# Altium schematic symbol library IntegratedCircuit.SchLib: 131 symbols (part 3 of 3)
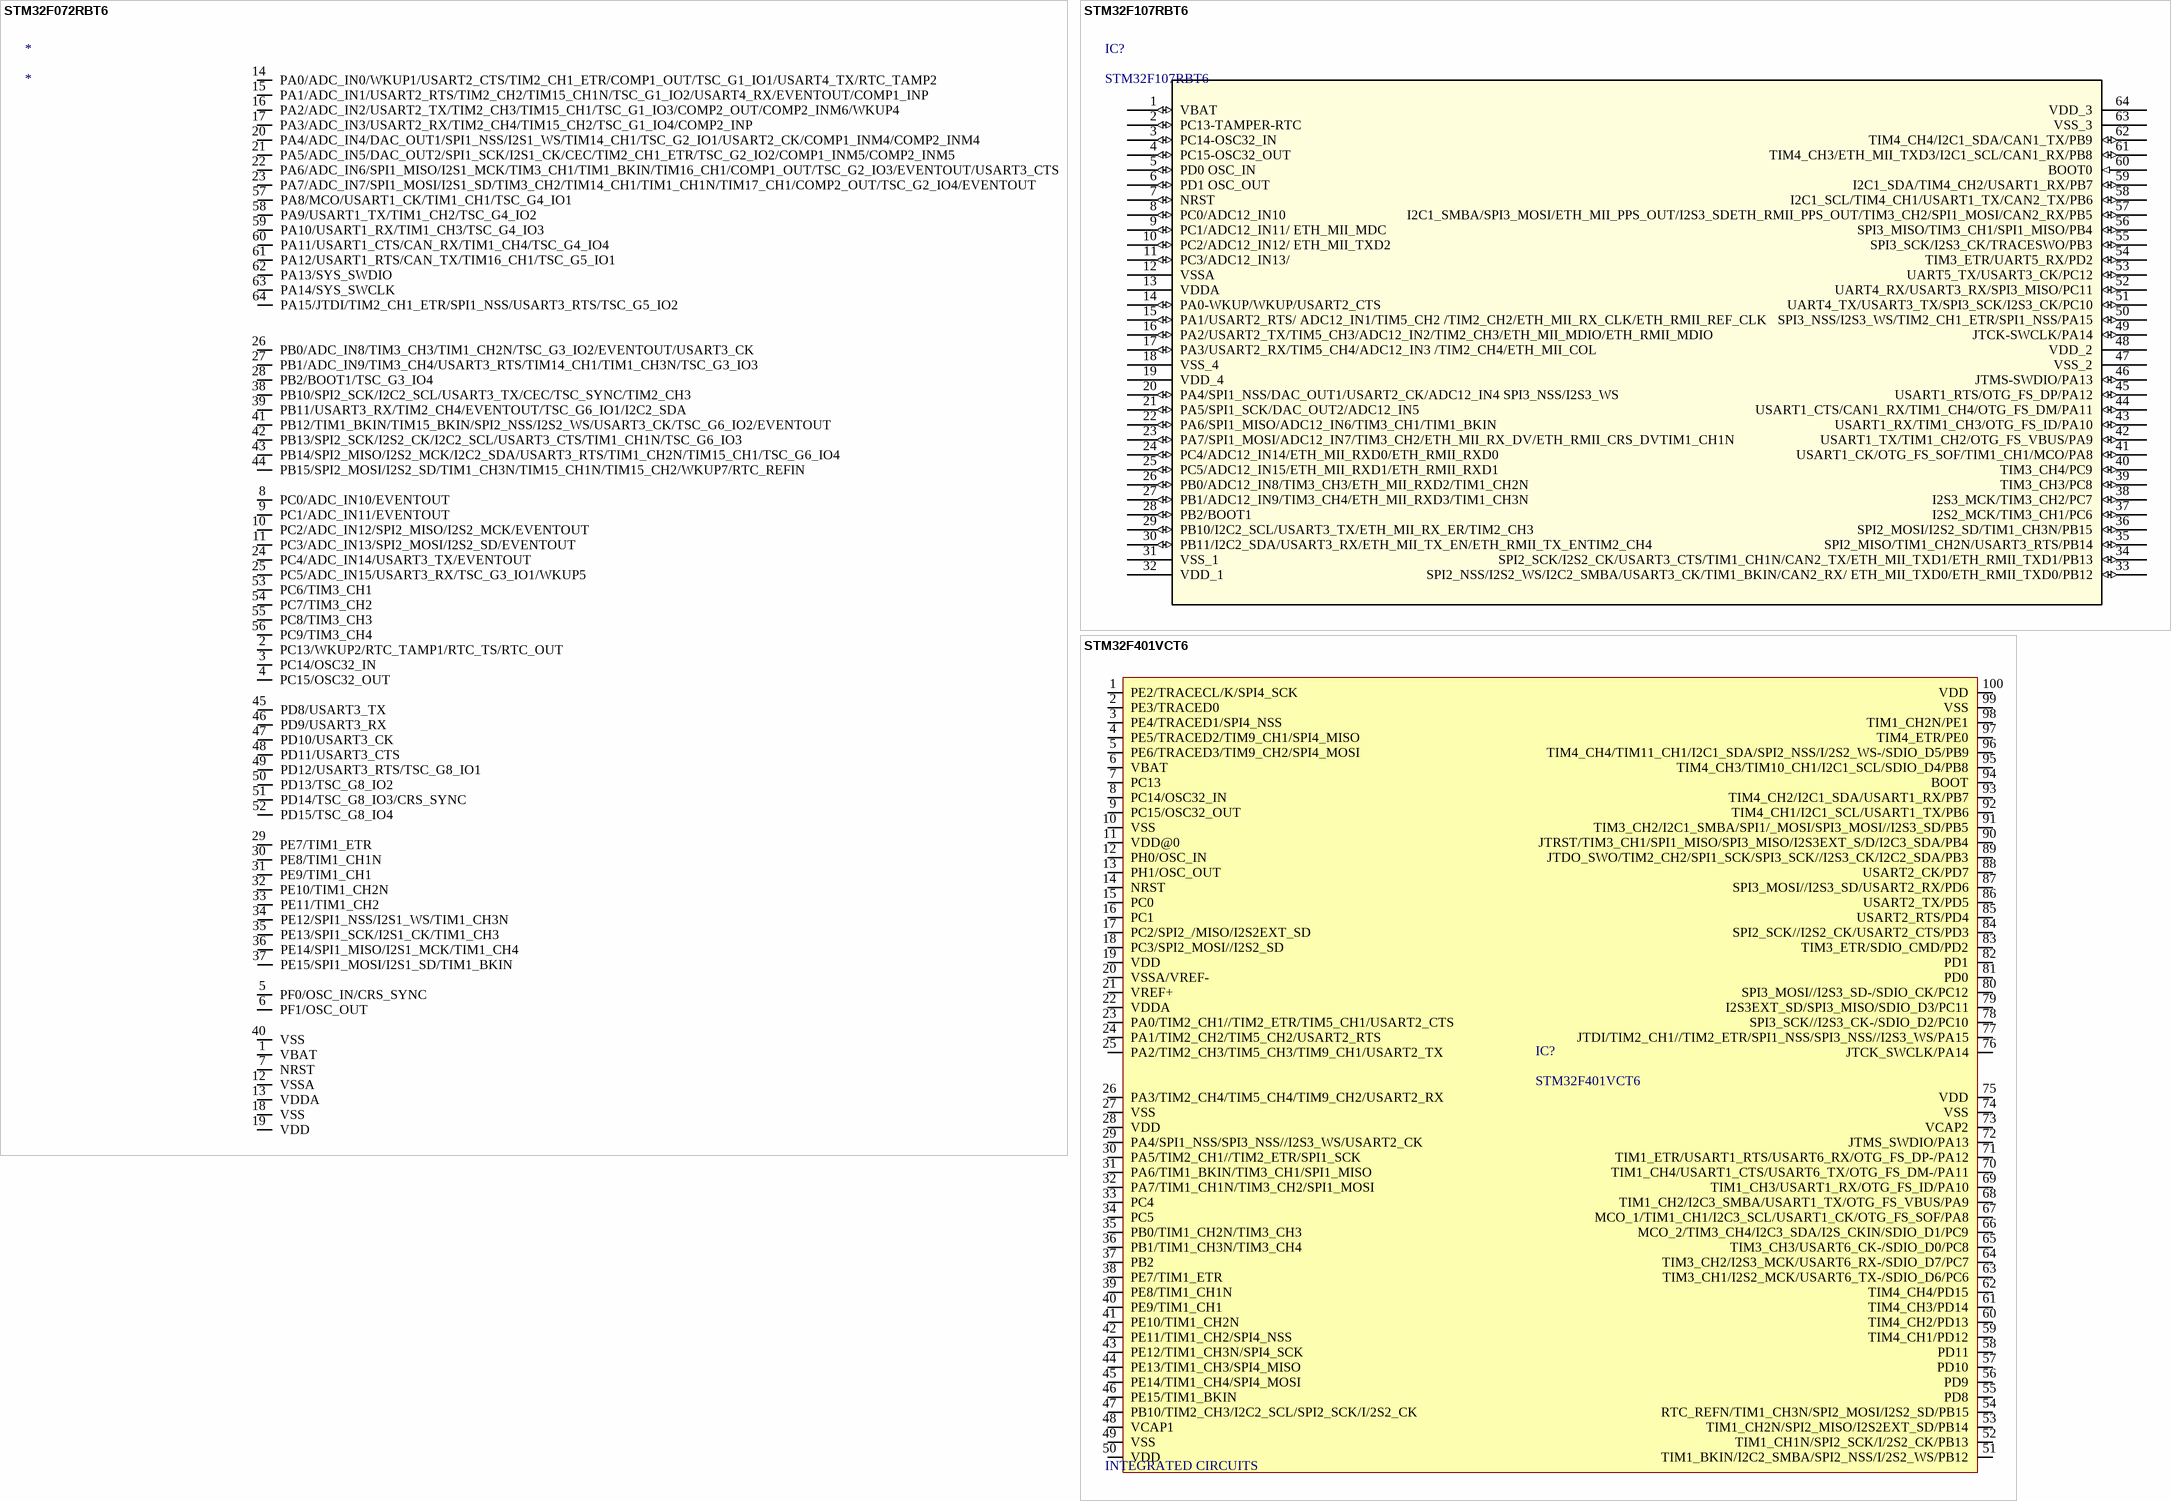
[diagram p13: symbols STM32F072RBT6 to STM32F401VCT6]

## STM32F401VCT6
designator IC?  Category: INTEGRATED CIRCUITS
STMICROELECTRONICS   STM32F401VCT6   32 Bit Microcontroller, Dynamic Efficiency Line, ARM Cortex-M4, 84 MHz, 256 KB, 64 KB, 100 Pins; Purpose Of Usage: BASIC; Supplier 1: Digi-Key; Supplier Part Number 1: 497-14048-ND; Manufacturer: STMicroelectronics; Manufacturer Part Number: STM32F401VCT6; Stock 1: 5454; RoHS: YES; Case/Package: LQFP; Package Quantity: 540; Lead Free: Lead Free; Sub-Category: MCU; Mount: SMD; Stock ID: ??
footprint LQFP100_14X14
pins: 1 PE2/TRACECL/K/SPI4_SCK, 2 PE3/TRACED0, 3 PE4/TRACED1/SPI4_NSS, 4 PE5/TRACED2/TIM9_CH1/SPI4_MISO, 5 PE6/TRACED3/TIM9_CH2/SPI4_MOSI, 6 VBAT, 7 PC13, 8 PC14/OSC32_IN, 9 PC15/OSC32_OUT, 10 VSS, 11 VDD@0, 12 PH0/OSC_IN, 13 PH1/OSC_OUT, 14 NRST, 15 PC0, 16 PC1, 17 PC2/SPI2_/MISO/I2S2EXT_SD, 18 PC3/SPI2_MOSI//I2S2_SD, 19 VDD, 20 VSSA/VREF-, 21 VREF+, 22 VDDA, 23 PA0/TIM2_CH1//TIM2_ETR/TIM5_CH1/USART2_CTS, 24 PA1/TIM2_CH2/TIM5_CH2/USART2_RTS, 25 PA2/TIM2_CH3/TIM5_CH3/TIM9_CH1/USART2_TX, 26 PA3/TIM2_CH4/TIM5_CH4/TIM9_CH2/USART2_RX, 27 VSS, 28 VDD, 29 PA4/SPI1_NSS/SPI3_NSS//I2S3_WS/USART2_CK, 30 PA5/TIM2_CH1//TIM2_ETR/SPI1_SCK, 31 PA6/TIM1_BKIN/TIM3_CH1/SPI1_MISO, 32 PA7/TIM1_CH1N/TIM3_CH2/SPI1_MOSI, 33 PC4, 34 PC5, 35 PB0/TIM1_CH2N/TIM3_CH3, 36 PB1/TIM1_CH3N/TIM3_CH4, 37 PB2, 38 PE7/TIM1_ETR, 39 PE8/TIM1_CH1N, 40 PE9/TIM1_CH1, 41 PE10/TIM1_CH2N, 42 PE11/TIM1_CH2/SPI4_NSS, 43 PE12/TIM1_CH3N/SPI4_SCK, 44 PE13/TIM1_CH3/SPI4_MISO, 45 PE14/TIM1_CH4/SPI4_MOSI, 46 PE15/TIM1_BKIN, 47 PB10/TIM2_CH3/I2C2_SCL/SPI2_SCK/I/2S2_CK, 48 VCAP1, 49 VSS, 50 VDD, 51 TIM1_BKIN/I2C2_SMBA/SPI2_NSS/I/2S2_WS/PB12, 52 TIM1_CH1N/SPI2_SCK/I/2S2_CK/PB13, 53 TIM1_CH2N/SPI2_MISO/I2S2EXT_SD/PB14, 54 RTC_REFN/TIM1_CH3N/SPI2_MOSI/I2S2_SD/PB15, 55 PD8, 56 PD9, 57 PD10, 58 PD11, 59 TIM4_CH1/PD12, 60 TIM4_CH2/PD13, 61 TIM4_CH3/PD14, 62 TIM4_CH4/PD15, 63 TIM3_CH1/I2S2_MCK/USART6_TX-/SDIO_D6/PC6, 64 TIM3_CH2/I2S3_MCK/USART6_RX-/SDIO_D7/PC7, 65 TIM3_CH3/USART6_CK-/SDIO_D0/PC8, 66 MCO_2/TIM3_CH4/I2C3_SDA/I2S_CKIN/SDIO_D1/PC9, 67 MCO_1/TIM1_CH1/I2C3_SCL/USART1_CK/OTG_FS_SOF/PA8, 68 TIM1_CH2/I2C3_SMBA/USART1_TX/OTG_FS_VBUS/PA9, 69 TIM1_CH3/USART1_RX/OTG_FS_ID/PA10, 70 TIM1_CH4/USART1_CTS/USART6_TX/OTG_FS_DM-/PA11, 71 TIM1_ETR/USART1_RTS/USART6_RX/OTG_FS_DP-/PA12, 72 JTMS_SWDIO/PA13, 73 VCAP2, 74 VSS, 75 VDD, 76 JTCK_SWCLK/PA14, 77 JTDI/TIM2_CH1//TIM2_ETR/SPI1_NSS/SPI3_NSS//I2S3_WS/PA15, 78 SPI3_SCK//I2S3_CK-/SDIO_D2/PC10, 79 I2S3EXT_SD/SPI3_MISO/SDIO_D3/PC11, 80 SPI3_MOSI//I2S3_SD-/SDIO_CK/PC12, 81 PD0, 82 PD1, 83 TIM3_ETR/SDIO_CMD/PD2, 84 SPI2_SCK//I2S2_CK/USART2_CTS/PD3, 85 USART2_RTS/PD4, 86 USART2_TX/PD5, 87 SPI3_MOSI//I2S3_SD/USART2_RX/PD6, 88 USART2_CK/PD7, 89 JTDO_SWO/TIM2_CH2/SPI1_SCK/SPI3_SCK//I2S3_CK/I2C2_SDA/PB3, 90 JTRST/TIM3_CH1/SPI1_MISO/SPI3_MISO/I2S3EXT_S/D/I2C3_SDA/PB4, 91 TIM3_CH2/I2C1_SMBA/SPI1/_MOSI/SPI3_MOSI//I2S3_SD/PB5, 92 TIM4_CH1/I2C1_SCL/USART1_TX/PB6, 93 TIM4_CH2/I2C1_SDA/USART1_RX/PB7, 94 BOOT, 95 TIM4_CH3/TIM10_CH1/I2C1_SCL/SDIO_D4/PB8, 96 TIM4_CH4/TIM11_CH1/I2C1_SDA/SPI2_NSS/I/2S2_WS-/SDIO_D5/PB9, 97 TIM4_ETR/PE0, 98 TIM1_CH2N/PE1, 99 VSS, 100 VDD

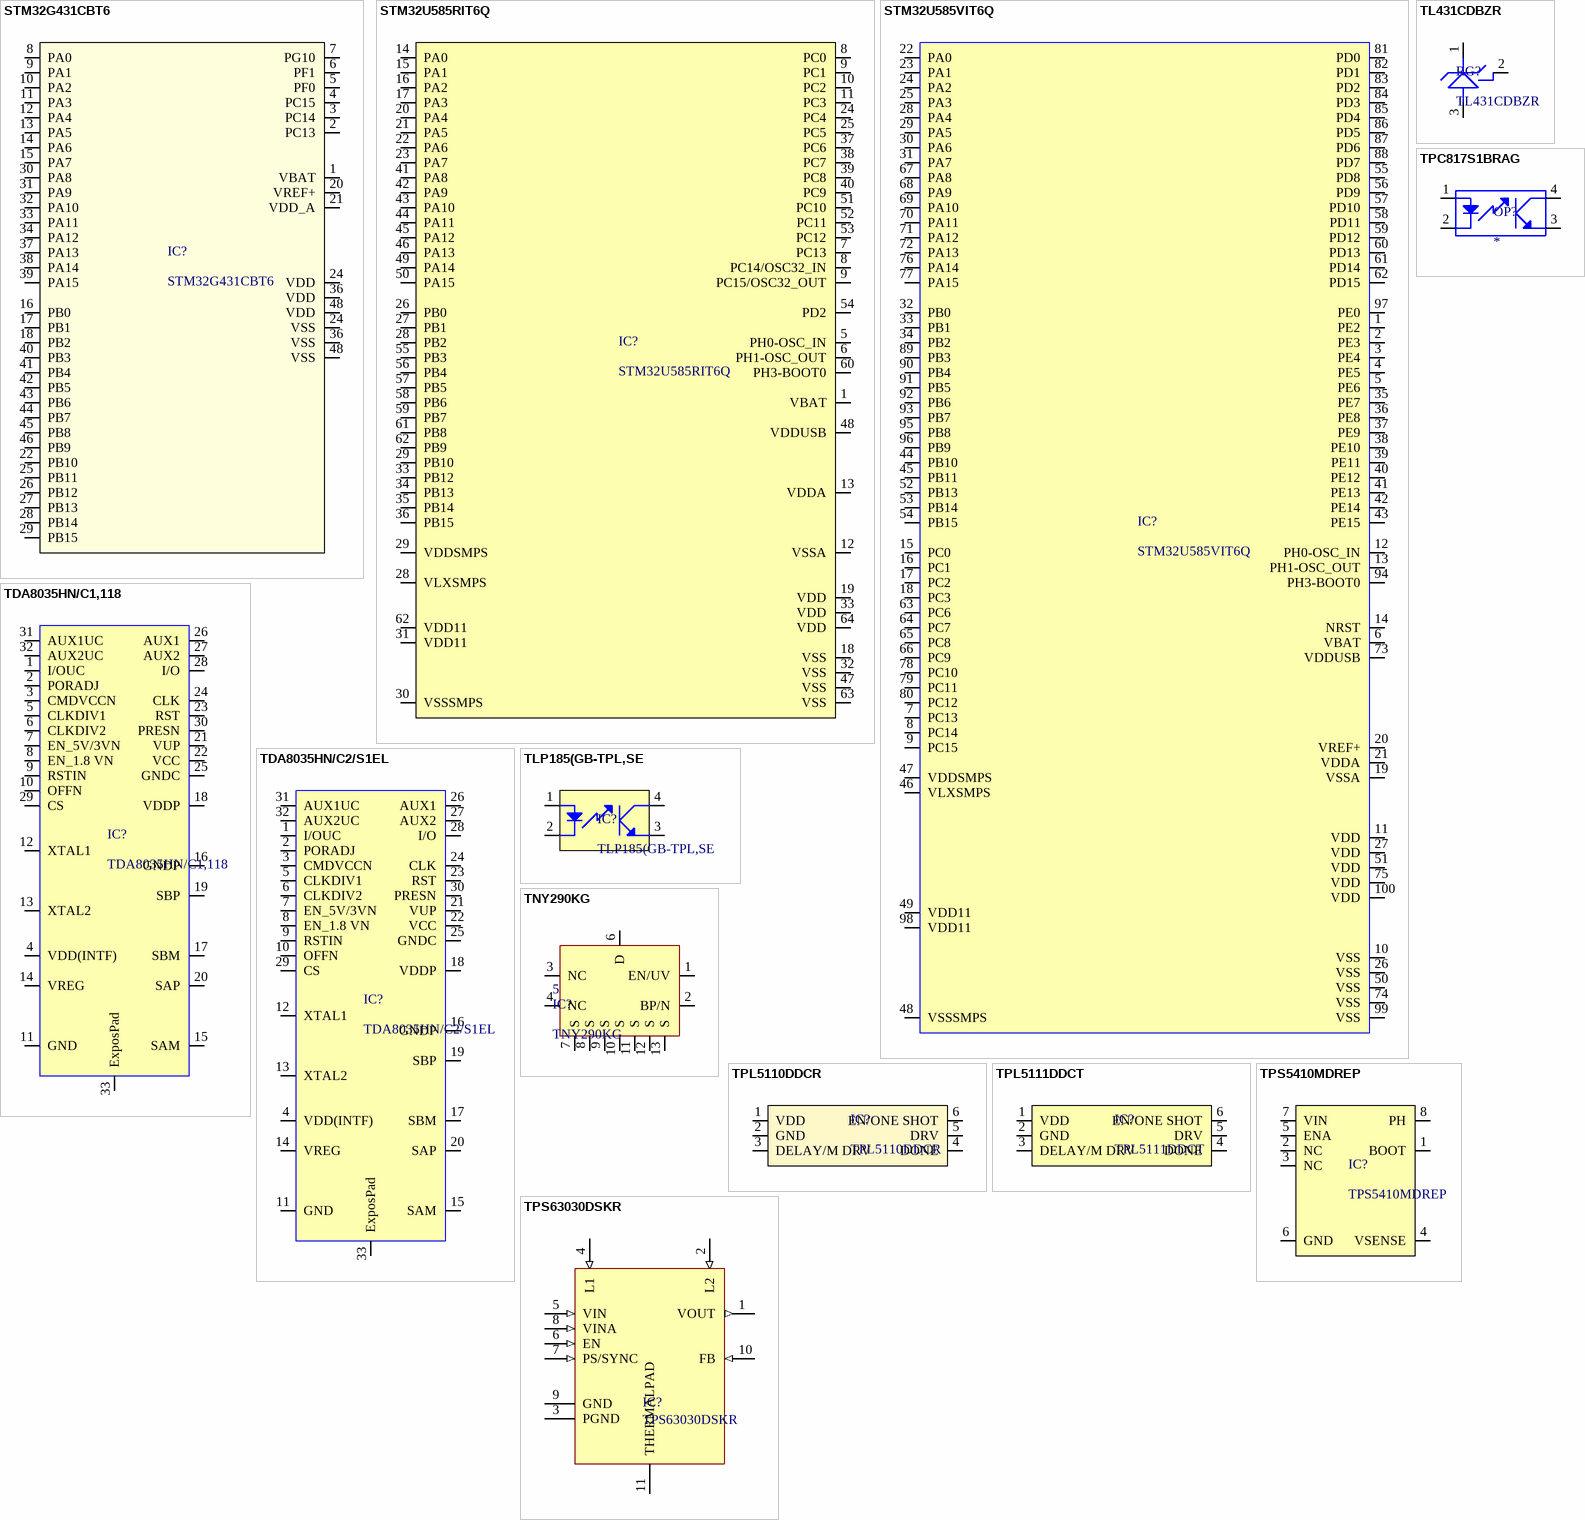
[diagram p10: symbols STM32G431CBT6 to TPS63030DSKR]

## STM32G431CBT6
designator IC?
MCU 32-bit ARM Cortex M4 RISC 128KB Flash 1.8V/2.5V/3.3V 48-Pin LQFP Tray; Manufacturer: STMicroelectronics; Max Supply Voltage: 3.6V; Min Supply Voltage: 1.62V; Purpose Of Usage: BASIC; Manufacturer Part Number: STM32G431CBT6; RoHS: YES; Category: INTEGRATED CIRCUITS; Case/Package: LQFP; Lead Free: Lead Free; Max Operating Temperature: 85°C; Min Operating Temperature: -40°C; Mount: SMD; Stock ID: ??; Sub-Category: MCU; Supplier 1: Digi-Key; Supplier Part Number 1: 497-19473-ND
footprint LQFP48-7x7mm
pins: 1 VBAT, 2 PC13, 3 PC14, 4 PC15, 5 PF0, 6 PF1, 7 PG10, 8 PA0, 9 PA1, 10 PA2, 11 PA3, 12 PA4, 13 PA5, 14 PA6, 15 PA7, 16 PB0, 17 PB1, 18 PB2, 20 VREF+, 21 VDD_A, 22 PB10, 24 VSS, 24 VDD, 25 PB11, 26 PB12, 27 PB13, 28 PB14, 29 PB15, 30 PA8, 31 PA9, 32 PA10, 33 PA11, 34 PA12, 36 VSS, 36 VDD, 37 PA13, 38 PA14, 39 PA15, 40 PB3, 41 PB4, 42 PB5, 43 PB6, 44 PB7, 45 PB8, 46 PB9, 48 VSS, 48 VDD

## STM32U585RIT6Q
designator IC?
MCU 32-Bit STM32U585 ARM Cortex-M33F RISC 2MB Flash 1.71V to 3.6V 64-Pin LQFP Tray; Manufacturer: STMicroelectronics; Purpose Of Usage: BASIC; Supplier 1: Mouser; Manufacturer Part Number: STM32U585RIT6Q; RoHS: NO; Category: INTEGRATED CIRCUITS; Sub-Category: MCU; Mount: SMD; Case/Package: LQFP; Lead Free: Lead Free; Stock ID: ??
footprint LQFP64-10x10mm_STM
pins: 1 VBAT (power), 5 PH0-OSC_IN, 6 PH1-OSC_OUT, 7 PC13, 8 PC0, 8 PC14/OSC32_IN, 9 PC1, 9 PC15/OSC32_OUT, 10 PC2, 11 PC3, 12 VSSA (power), 13 VDDA (power), 14 PA0, 15 PA1, 16 PA2, 17 PA3, 18 VSS (power), 19 VDD (power), 20 PA4, 21 PA5, 22 PA6, 23 PA7, 24 PC4, 25 PC5, 26 PB0, 27 PB1, 28 PB2, 28 VLXSMPS (power), 29 PB10, 29 VDDSMPS (power), 30 VSSSMPS (power), 31 VDD11 (power), 32 VSS (power), 33 PB12, 33 VDD (power), 34 PB13, 35 PB14, 36 PB15, 37 PC6, 38 PC7, 39 PC8, 40 PC9, 41 PA8, 42 PA9, 43 PA10, 44 PA11, 45 PA12, 46 PA13, 47 VSS (power), 48 VDDUSB (power), 49 PA14, 50 PA15, 51 PC10, 52 PC11, 53 PC12, 54 PD2, 55 PB3, 56 PB4, 57 PB5, 58 PB6, 59 PB7, 60 PH3-BOOT0, 61 PB8, 62 PB9, 62 VDD11 (power), 63 VSS (power), 64 VDD (power)

## STM32U585VIT6Q
designator IC?
MCU 32-Bit STM32U585 ARM Cortex-M33F RISC 2MB Flash 1.71V to 3.6V 100-Pin LQFP Tray; Manufacturer: STMicroelectronics; Purpose Of Usage: BASIC; Supplier 1: Mouser; Manufacturer Part Number: STM32U585VIT6Q; RoHS: NO; Category: INTEGRATED CIRCUITS; Supplier Part Number 1: 511-STM32U585VIT6Q; Sub-Category: MCU; Mount: SMD; Case/Package: LQFP; Lead Free: Lead Free; Stock ID: ??; Local Supplier: FUTURE; Price 10K: 6.15
footprint TSQFP50P1600X1600X160-100N (TSQFP, 100-Leads, Body 14.00x14.00mm, Pitch 0.50mm, IPC Medium Density)
pins: 1 PE2, 2 PE3, 3 PE4, 4 PE5, 5 PE6, 6 VBAT, 7 PC13, 8 PC14, 9 PC15, 10 VSS, 11 VDD, 12 PH0-OSC_IN, 13 PH1-OSC_OUT, 14 NRST, 15 PC0, 16 PC1, 17 PC2, 18 PC3, 19 VSSA, 20 VREF+, 21 VDDA, 22 PA0, 23 PA1, 24 PA2, 25 PA3, 26 VSS, 27 VDD, 28 PA4, 29 PA5, 30 PA6, 31 PA7, 32 PB0, 33 PB1, 34 PB2, 35 PE7, 36 PE8, 37 PE9, 38 PE10, 39 PE11, 40 PE12, 41 PE13, 42 PE14, 43 PE15, 44 PB10, 45 PB11, 46 VLXSMPS, 47 VDDSMPS, 48 VSSSMPS, 49 VDD11, 50 VSS, 51 VDD, 52 PB13, 53 PB14, 54 PB15, 55 PD8, 56 PD9, 57 PD10, 58 PD11, 59 PD12, 60 PD13, 61 PD14, 62 PD15, 63 PC6, 64 PC7, 65 PC8, 66 PC9, 67 PA8, 68 PA9, 69 PA10, 70 PA11, 71 PA12, 72 PA13, 73 VDDUSB, 74 VSS, 75 VDD, 76 PA14, 77 PA15, 78 PC10, 79 PC11, 80 PC12, 81 PD0, 82 PD1, 83 PD2, 84 PD3, 85 PD4, 86 PD5, 87 PD6, 88 PD7, 89 PB3, 90 PB4, 91 PB5, 92 PB6, 93 PB7, 94 PH3-BOOT0, 95 PB8, 96 PB9, 97 PE0, 98 VDD11, 99 VSS, 100 VDD

## TDA8035HN/C1,118
designator IC?
TDA8035 Series 5.5 V High Integrated and Low Power Smart Card Interface-HVQFN-32; Manufacturer: NXP Semiconductors; Purpose Of Usage: BASIC; Supplier 1: Digi-Key; Manufacturer Part Number: TDA8035HN/C1,118; RoHS: YES; Category: INTEGRATED CIRCUITS; Stock 1: 5951; Mount: SMD; Package Quantity: 6000; Supplier Part Number 1: 568-13258-1-ND; Sub-Category: SMART CARD DRIVER; Case/Package: QFN; Lead Free: Lead Free; Stock ID: ??
footprint SOT617-7 (PQFN, 32-Leads, Body 5.00x5.00mm, Pitch 0.50mm, Thermal Pad 2.10x2.10mm, IPC Medium Density)
pins: 1 I/OUC, 2 PORADJ, 3 CMDVCCN, 4 VDD(INTF), 5 CLKDIV1, 6 CLKDIV2, 7 EN_5V/3VN, 8 EN_1.8 VN, 9 RSTIN, 10 OFFN, 11 GND, 12 XTAL1, 13 XTAL2, 14 VREG, 15 SAM, 16 GNDP, 17 SBM, 18 VDDP, 19 SBP, 20 SAP, 21 VUP, 22 VCC, 23 RST, 24 CLK, 25 GNDC, 26 AUX1, 27 AUX2, 28 I/O, 29 CS, 30 PRESN, 31 AUX1UC, 32 AUX2UC, 33 ExposPad

## TDA8035HN/C2/S1EL
designator IC?
Interface - Specialized High integrated and low power smart card interface; Manufacturer: NXP Semiconductors; Purpose Of Usage: BASIC; Supplier 1: Digi-Key; Manufacturer Part Number: TDA8035HN/C2/S1EL; RoHS: YES; Category: INTEGRATED CIRCUITS; Stock 1: 878; Supplier Part Number 1: 568-14997-ND; Sub-Category: SMART CARD DRIVER; Mount: SMD; Case/Package: QFN; Lead Free: Lead Free; Stock ID: ??; Local Supplier: AVNET; Price 10K: 0.35
footprint SOT617-7 (PQFN, 32-Leads, Body 5.00x5.00mm, Pitch 0.50mm, Thermal Pad 2.10x2.10mm, IPC Medium Density)
pins: 1 I/OUC, 2 PORADJ, 3 CMDVCCN, 4 VDD(INTF), 5 CLKDIV1, 6 CLKDIV2, 7 EN_5V/3VN, 8 EN_1.8 VN, 9 RSTIN, 10 OFFN, 11 GND, 12 XTAL1, 13 XTAL2, 14 VREG, 15 SAM, 16 GNDP, 17 SBM, 18 VDDP, 19 SBP, 20 SAP, 21 VUP, 22 VCC, 23 RST, 24 CLK, 25 GNDC, 26 AUX1, 27 AUX2, 28 I/O, 29 CS, 30 PRESN, 31 AUX1UC, 32 AUX2UC, 33 ExposPad

## TL431CDBZR
designator RG?
IC VREF SHUNT ADJ SOT23-3; Manufacturer: Texas Instruments; Purpose Of Usage: BASIC; Supplier 1: Digi-Key; Supplier Part Number 1: 296-17331-1-ND; Manufacturer Part Number: TL431CDBZR; RoHS: YES; Stock 1: 90156; Case/Package: SOT-23; Package Quantity: 1; Lead Free: Lead Free; Category: INTEGRATED CIRCUITS; Mount: SMD; Sub-Category: PMIC - VOLTAGE REFERANCE; Stock ID: ??
footprint SOT-23
pins: 1, 2, 3

## TLP185(GB-TPL,SE
designator IC?
Optocoupler DC-IN 1-CH Transistor DC-OUT 4-Pin SO; Manufacturer: Toshiba; Purpose Of Usage: BASIC; Supplier 1: Digi-Key; Manufacturer Part Number: TLP185(GB-TPL,SE; RoHS: YES; Stock 1: 6800; Mount: SMD; Case/Package: SMD/SMT; Package Quantity: 3000; Category: INTEGRATED CIRCUITS; Sub-Category: ISOLATOR; Lead Free: Lead Free; Stock ID: ??; MSL: 1; Supplier Part Number 1: TLP185(GB-TPLSETR-ND
footprint SOP-4
pins: 1, 2, 3, 4

## TNY290KG
designator IC?  Supplier Part Number 1: 596-1538-ND
TNY290 Series 725 V 140 kHz Energy-Efficient Off-Line Switcher - ESOP-12; Manufacturer: Power Integrations; Purpose Of Usage: BASIC; Supplier 1: Digi-Key; Manufacturer Part Number: TNY290KG; RoHS: YES; Stock 1: 3542; Mount: SMD; Case/Package: SOP; Package Quantity: 48; Category: INTEGRATED CIRCUITS; Sub-Category: PMIC - AC/DC Switching Regulator; Lead Free: Lead Free; Stock ID: ??
footprint TNY290KG
pins: 1 EN/UV, 2 BP/N, 3 NC, 4 NC, 6 D, 7 S, 8 S, 9 S, 10 S, 11 S, 12 S, 13 S

## TPC817S1BRAG
designator OP?
OPTOISO 5KV TRANS 4SOP; Manufacturer: Taiwan Semiconductor; Manufacturer Part Number: TPC817S1BRAG; Purpose Of Usage: BASIC; Supplier 1: Digi-Key; Supplier Part Number 1: TPC817S1BRAGCT-ND; RoHS: NO; Stock 1: 7592; Category: INTEGRATED CIRCUITS; Mount: SMD; Sub-Category: ISOLATOR; Case/Package: DIL; Lead Free: Lead Free; Stock ID: ??
footprint DIL4_SMD
pins: 1, 2, 3, 4

## TPL5110DDCR
designator IC?
IC TIMER MOS DRIVER/PWR ON 6-SOT; Manufacturer: Texas Instruments; Purpose Of Usage: BASIC; Manufacturer Part Number: TPL5110DDCR; RoHS: YES; Category: INTEGRATED CIRCUITS; Lead Free: Lead Free; Mount: SMD; Stock ID: ??; Sub-Category: SYSTEM TIMER; Supplier 1: Digi-Key; Supplier Part Number 1: 296-47225-1-ND; Case/Package: SOT-23-6
footprint SOT23-6 (SOT23, 6-Leads, Body 2.73x2.80mm, Pitch 0.95mm, IPC Medium Density)
pins: 1 VDD, 2 GND, 3 DELAY/M DRV, 4 DONE, 5 DRV, 6 EN/ONE SHOT

## TPL5111DDCT
designator IC?
Ultra low power system timer (35 nA) for power gating in duty cycled applications 6-SOT-23-THIN -40 to 105; Manufacturer: Texas Instruments; Purpose Of Usage: BASIC; Manufacturer Part Number: TPL5111DDCT; RoHS: YES; Category: INTEGRATED CIRCUITS; Case/Package: SOT-23-6; Lead Free: Lead Free; Mount: SMD; Stock ID: ??; Sub-Category: SYSTEM TIMER; Supplier 1: Digi-Key; Supplier Part Number 1: 296-42621-1-ND
footprint SOT23-6 (SOT23, 6-Leads, Body 2.73x2.80mm, Pitch 0.95mm, IPC Medium Density)
pins: 1 VDD, 2 GND, 3 DELAY/M DRV, 4 DONE, 5 DRV, 6 EN/ONE SHOT

## TPS5410MDREP
designator IC?
Enhanced Product 5.5V to 36V, 1A, 500kHz Step Down Converter 8-SOIC -55 to 125; Manufacturer: Texas Instruments; Purpose Of Usage: BASIC; Topology: BUCK; Manufacturer Part Number: TPS5410MDREP; RoHS: YES; Category: INTEGRATED CIRCUITS; Case/Package: SOIC; Lead Free: Lead Free; Max Operating Temperature: 125°C; Max Supply Voltage: 36V; Min Operating Temperature: -55°C; Min Supply Voltage: 5.5V; Mount: SMD; MSL: 1; Stock ID: ??; Sub-Category: PMIC - DC/DC Switching Regulator; Supplier 1: Digi-Key; Supplier Part Number 1: 296-25179-2-ND
footprint SO08
pins: 1 BOOT, 2 NC (power), 3 NC (power), 4 VSENSE (power), 5 ENA, 6 GND, 7 VIN, 8 PH

## TPS63030DSKR
designator IC?
IC REG BUCK BOOST ADJ 0.9A 10SON; Manufacturer: Texas Instruments; Purpose Of Usage: BASIC; Topology: BUCK-BOOST; Supplier 1: Digi-Key; Manufacturer Part Number: TPS63030DSKR; Stock 1: 9885; RoHS: YES; Mount: SMD; Package Quantity: 3000; Lead Free: Lead Free; Category: INTEGRATED CIRCUITS; Supplier Part Number 1: 296-39460-1-ND; Sub-Category: PMIC - DC/DC Switching Regulator; Case/Package: WSON-10; Stock ID: ??
footprint WSON-10
pins: 1 VOUT (out), 2 L2 (in), 3 PGND, 4 L1 (in), 5 VIN (in), 6 EN (in), 7 PS/SYNC (in), 8 VINA (in), 9 GND, 10 FB (in), 11 THERMALPAD

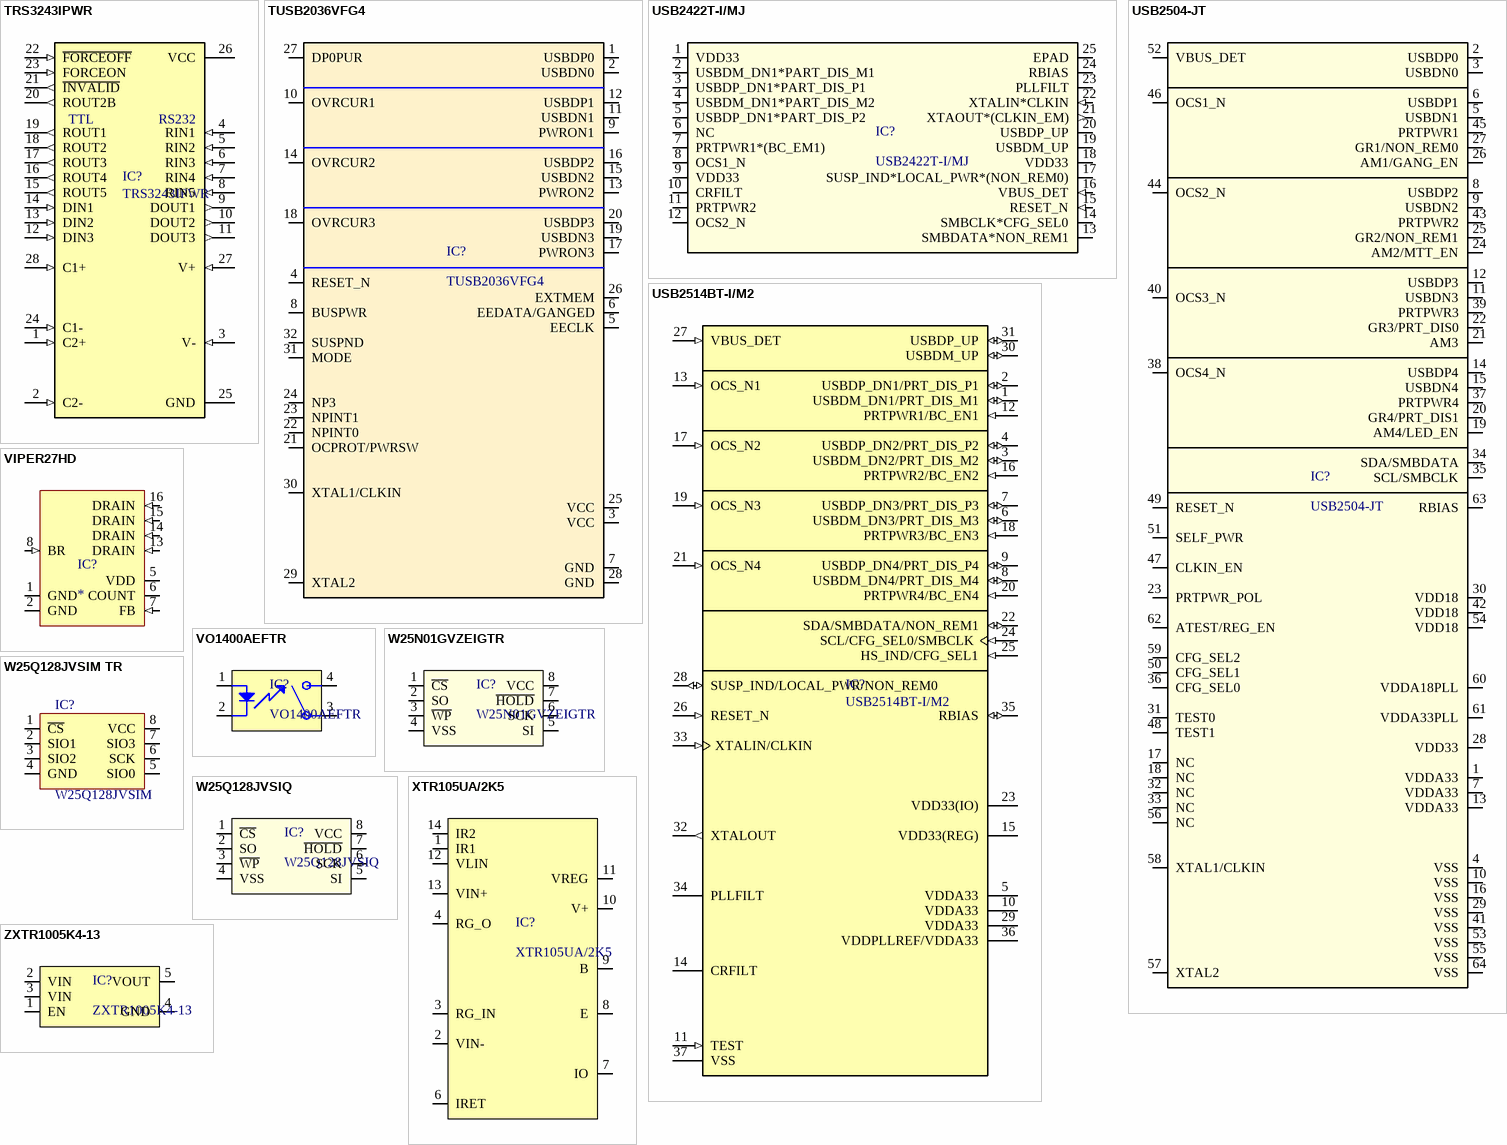
[diagram p11: symbols TRS3243IPWR to ZXTR1005K4-13]

## TRS3243IPWR
designator IC?
3-V to 5.5-V Multichannel RS-232 Line Driver/Receiver With +/-15-kV (HBM) ESD Protection 28-TSSOP -40 to 85; Manufacturer: Texas Instruments; Purpose Of Usage: BASIC; Supplier 1: Mouser; Supplier Part Number 1: 595-TRS3243IPWR; Manufacturer Part Number: TRS3243IPWR; Stock 1: 2373; Mount: SMD; Case/Package: TSSOP; Package Quantity: 1; Lead Free: Lead Free; Category: INTEGRATED CIRCUITS; Sub-Category: RS232 to TTL; RoHS: YES; Stock ID: ??
footprint TSSOP-28
pins: 1 C2+ (in), 2 C2- (in), 3 V- (in), 4 RIN1 (in), 5 RIN2 (in), 6 RIN3 (in), 7 RIN4 (in), 8 RIN5 (in), 9 DOUT1 (out), 10 DOUT2 (out), 11 DOUT3 (out), 12 DIN3 (in), 13 DIN2 (in), 14 DIN1 (in), 15 ROUT5 (out), 16 ROUT4 (out), 17 ROUT3 (out), 18 ROUT2 (out), 19 ROUT1 (out), 20 ROUT2B (out), 21 ~{INVALID} (out), 22 ~{FORCEOFF} (in), 23 FORCEON (in), 24 C1- (in), 25 GND (power), 26 VCC (power), 27 V+ (in), 28 C1+ (in)
text: TTL; RS232

## TUSB2036VFG4
designator IC?
2/3-port 12-Mbps USB full-speed hub with optional serial EEPROM interface 32-LQFP 0 to 70; Manufacturer: Texas Instruments; Purpose Of Usage: BASIC; Supplier 1: Digi-Key; Manufacturer Part Number: TUSB2036VFG4; Stock 1: 0; Case/Package: LQFP; Package Quantity: 250; Lead Free: Lead Free; Supplier Part Number 1: 296-17784-ND; Category: INTEGRATED CIRCUITS; Sub-Category: USB HUB; Mount: SMD; RoHS: YES; Stock ID: ??
footprint HLQFP32
pins: 1 USBDP0, 2 USBDN0, 3 VCC, 4 RESET_N, 5 EECLK, 6 EEDATA/GANGED, 7 GND, 8 BUSPWR, 9 PWRON1, 10 OVRCUR1, 11 USBDN1, 12 USBDP1, 13 PWRON2, 14 OVRCUR2, 15 USBDN2, 16 USBDP2, 17 PWRON3, 18 OVRCUR3, 19 USBDN3, 20 USBDP3, 21 OCPROT/PWRSW, 22 NPINT0, 23 NPINT1, 24 NP3, 25 VCC, 26 EXTMEM, 27 DP0PUR, 28 GND, 29 XTAL2, 30 XTAL1/CLKIN, 31 MODE, 32 SUSPND

## USB2422T-I/MJ
designator IC?
IC HUB CTLR USB 2.0 24QFN; Manufacturer: Microchip; Purpose Of Usage: BASIC; Manufacturer Part Number: USB2422T-I/MJ; Stock 1: 3302; RoHS: YES; Case/Package: QFN; Package Quantity: 5000; Lead Free: Lead Free; Category: INTEGRATED CIRCUITS; Supplier 1: Digi-Key; Supplier Part Number 1: USB2422T-I/MJCT-ND; Sub-Category: USB HUB; Mount: SMD; Stock ID: ??
footprint SQFN24_4X4MC
pins: 1 VDD33 (power), 2 USBDM_DN1*PART_DIS_M1 (io), 3 USBDP_DN1*PART_DIS_P1 (io), 4 USBDM_DN1*PART_DIS_M2 (io), 5 USBDP_DN1*PART_DIS_P2 (io), 6 NC, 7 PRTPWR1*(BC_EM1) (power), 8 OCS1_N (io), 9 VDD33 (power), 10 CRFILT, 11 PRTPWR2 (power), 12 OCS2_N (io), 13 SMBDATA*NON_REM1 (io), 14 SMBCLK*CFG_SEL0 (io), 15 RESET_N (in), 16 VBUS_DET (in), 17 SUSP_IND*LOCAL_PWR*(NON_REM0) (io), 18 VDD33 (power), 19 USBDM_UP (io), 20 USBDP_UP (io), 21 XTAOUT*(CLKIN_EM) (out), 22 XTALIN*CLKIN (in), 23 PLLFILT, 24 RBIAS, 25 EPAD

## USB2504-JT
designator IC?
Low Speed/Full Speed/High Speed Compatible 4 Port Hub USB 2.0 1.8V/3.3V 64-Pin TQFP; Manufacturer: Microchip; Purpose Of Usage: BASIC; Supplier 1: Digi-Key; Manufacturer Part Number: USB2504-JT; Stock 1: 112; RoHS: YES; Mount: SMD; Case/Package: TQFP; Package Quantity: 160; Lead Free: Lead Free; Supplier Part Number 1: USB2504-JT-ND; Category: INTEGRATED CIRCUITS; Sub-Category: USB HUB; Stock ID: ??
footprint TQFP64
pins: 1 VDDA33, 2 USBDP0, 3 USBDN0, 4 VSS, 5 USBDN1, 6 USBDP1, 7 VDDA33, 8 USBDP2, 9 USBDN2, 10 VSS, 11 USBDN3, 12 USBDP3, 13 VDDA33, 14 USBDP4, 15 USBDN4, 16 VSS, 17 NC, 18 NC, 19 AM4/LED_EN, 20 GR4/PRT_DIS1, 21 AM3, 22 GR3/PRT_DIS0, 23 PRTPWR_POL, 24 AM2/MTT_EN, 25 GR2/NON_REM1, 26 AM1/GANG_EN, 27 GR1/NON_REM0, 28 VDD33, 29 VSS, 30 VDD18, 31 TEST0, 32 NC, 33 NC, 34 SDA/SMBDATA, 35 SCL/SMBCLK, 36 CFG_SEL0, 37 PRTPWR4, 38 OCS4_N, 39 PRTPWR3, 40 OCS3_N, 41 VSS, 42 VDD18, 43 PRTPWR2, 44 OCS2_N, 45 PRTPWR1, 46 OCS1_N, 47 CLKIN_EN, 48 TEST1, 49 RESET_N, 50 CFG_SEL1, 51 SELF_PWR, 52 VBUS_DET, 53 VSS, 54 VDD18, 55 VSS, 56 NC, 57 XTAL2, 58 XTAL1/CLKIN, 59 CFG_SEL2, 60 VDDA18PLL, 61 VDDA33PLL, 62 ATEST/REG_EN, 63 RBIAS, 64 VSS

## USB2514BT-I/M2
designator IC?
USB 2.0 Hi-Speed 4-Port Hub Controller 36-Pin SQFN T/R; Manufacturer: Microchip; Purpose Of Usage: BASIC; Supplier 1: Digi-Key; Manufacturer Part Number: USB2514BT-I/M2; Stock 1: 2777; RoHS: YES; Category: INTEGRATED CIRCUITS; Supplier Part Number 1: USB2514BT-I/M2CT-ND; Sub-Category: USB HUB; Mount: SMD; Case/Package: QFN; Lead Free: Lead Free; Stock ID: ??
footprint QFN50P600X600X100-37N
pins: 1 USBDM_DN1/PRT_DIS_M1 (io), 2 USBDP_DN1/PRT_DIS_P1 (io), 3 USBDM_DN2/PRT_DIS_M2 (io), 4 USBDP_DN2/PRT_DIS_P2 (io), 5 VDDA33 (power), 6 USBDM_DN3/PRT_DIS_M3 (io), 7 USBDP_DN3/PRT_DIS_P3 (io), 8 USBDM_DN4/PRT_DIS_M4 (io), 9 USBDP_DN4/PRT_DIS_P4 (io), 10 VDDA33 (power), 11 TEST (in), 12 PRTPWR1/BC_EN1 (in), 13 OCS_N1 (in), 14 CRFILT, 15 VDD33(REG) (power), 16 PRTPWR2/BC_EN2 (in), 17 OCS_N2 (in), 18 PRTPWR3/BC_EN3 (in), 19 OCS_N3 (in), 20 PRTPWR4/BC_EN4 (in), 21 OCS_N4 (in), 22 SDA/SMBDATA/NON_REM1 (io), 23 VDD33(IO) (power), 24 SCL/CFG_SEL0/SMBCLK (in), 25 HS_IND/CFG_SEL1 (in), 26 RESET_N (in), 27 VBUS_DET (in), 28 SUSP_IND/LOCAL_PWR/NON_REM0 (io), 29 VDDA33 (power), 30 USBDM_UP (io), 31 USBDP_UP (io), 32 XTALOUT (out), 33 XTALIN/CLKIN (in), 34 PLLFILT, 35 RBIAS (io), 36 VDDPLLREF/VDDA33 (power), 37 VSS (power)

## VIPER27HD
designator IC?
AC/DC Converters HI VOLT CONVERTER 800 V RUGGED; Manufacturer: STMicroelectronics; Manufacturer Part Number: VIPER27HD; Purpose Of Usage: BASIC; Supplier 1: Digi-Key; Supplier Part Number 1: 497-14812-5-ND; RoHS: YES; Stock 1: 823; Mount: SMD; Case/Package: SOIC; Package Quantity: 50; Category: INTEGRATED CIRCUITS; Sub-Category: PMIC - AC/DC Switching Regulator; Lead Free: Lead Free; Stock ID: ??
footprint SO16
pins: 1 GND (power), 2 GND (power), 5 VDD (power), 6 COUNT, 7 FB (in), 8 BR (in), 13 DRAIN (in), 14 DRAIN (in), 15 DRAIN (in), 16 DRAIN (in)

## VO1400AEFTR
designator IC?
1 FORM A SOLID STATE RELAY Transistor Output SSR, 1-Channel, 3750V Isolation; Manufacturer: Vishay; Max Supply Voltage: 1.4V; Purpose Of Usage: BASIC; Manufacturer Part Number: VO1400AEFTR; RoHS: YES; Category: INTEGRATED CIRCUITS; Case/Package: SOP; Lead Free: Lead Free; Max Operating Temperature: 85°C; Min Operating Temperature: -40°C; Mount: SMD; MSL: 1; Stock ID: ??; Sub-Category: SOLID STATE RELAY; Supplier 1: Digi-Key; Supplier Part Number 1: VO1400AEFTR-ND
footprint SOP-4
pins: 1, 2, 3, 4

## W25N01GVZEIGTR
designator IC?
IC FLASH 1G SPI 104MHZ 8WSON; Manufacturer: Winbond; Purpose Of Usage: BASIC; Supplier 1: Digi-Key; Supplier Part Number 1: W25N01GVZEIGCT-ND; Manufacturer Part Number: W25N01GVZEIGTR; Stock 1: 11865; RoHS: YES; Category: INTEGRATED CIRCUITS; Sub-Category: MEMORY - EEPROM; Mount: SMD; Case/Package: QFN; Lead Free: Lead Free; Stock ID: ??
footprint WSON8X6
pins: 1 ~{CS}, 2 SO, 3 ~{WP}, 4 VSS, 5 SI, 6 SCK, 7 ~{HOLD}, 8 VCC

## W25Q128JVSIM TR
designator IC?, comment W25Q128JVSIM
NOR Flash Serial (SPI, Dual SPI, Quad SPI) 3V/3.3V 128M-bit 16M x 8 6ns 8-Pin SOIC T/R/Tray/Tube; Manufacturer: Winbond; Manufacturer Part Number: W25Q128JVSIM TR; Purpose Of Usage: BASIC; Supplier 1: Digi-Key; RoHS: NO; Category: INTEGRATED CIRCUITS; Stock 1: 308413; Mount: SMD; Case/Package: SOIC; Supplier Part Number 1: W25Q128JVSIMTR-ND; Sub-Category: MEMORY - FLASH; Lead Free: Lead Free; Stock ID: ??
footprint SOIC127P600X175-8N (SOIC, 8-Leads, Body 4.90x3.90mm, Pitch 1.27mm, IPC Medium Density)
pins: 1 ~{CS}, 2 SIO1, 3 SIO2, 4 GND, 5 SIO0, 6 SCK, 7 SIO3, 8 VCC (power)

## W25Q128JVSIQ
designator IC?
IC FLASH 128M SPI 133MHZ 8SOIC; Manufacturer: Winbond; Purpose Of Usage: BASIC; Supplier 1: Digi-Key; Supplier Part Number 1: W25Q128JVSIQ-ND; Manufacturer Part Number: W25Q128JVSIQ; Stock 1: 10706; RoHS: YES; Case/Package: SOIC; Category: INTEGRATED CIRCUITS; Sub-Category: MEMORY - FLASH; Mount: SMD; Lead Free: Lead Free; Stock ID: ??
footprint SOIC127P600X175-8N (SOIC, 8-Leads, Body 4.90x3.90mm, Pitch 1.27mm, IPC Medium Density)
pins: 1 ~{CS}, 2 SO, 3 ~{WP}, 4 VSS, 5 SI, 6 SCK, 7 ~{HOLD}, 8 VCC

## XTR105UA/2K5
designator IC?
4-20mA Current Transmitter with Sensor Excitation and Linearization 14-SOIC -40 to 85; Manufacturer: Texas Instruments; Max Supply Voltage: 36V; Min Supply Voltage: 7.5V; Purpose Of Usage: BASIC; Manufacturer Part Number: XTR105UA/2K5; RoHS: YES; Category: INTEGRATED CIRCUITS; Case/Package: SOIC; Min Operating Temperature: -40°C; Max Operating Temperature: 85°C; Package Quantity: 2500; Lead Free: Lead Free; Mount: SMD; MSL: 1; Stock ID: ??; Sub-Category: SENSOR INTERFACE; Supplier 1: Digi-Key; Supplier Part Number 1: 296-43668-2-ND
footprint SOIC 14 (SOIC, 14-Leads, Body 9.90x3.90mm, Pitch 1.27mm, IPC Medium Density)
pins: 1 IR1, 2 VIN-, 3 RG_IN, 4 RG_O, 6 IRET, 7 IO, 8 E, 9 B, 10 V+, 11 VREG, 12 VLIN, 13 VIN+, 14 IR2

## ZXTR1005K4-13
designator IC?
100Vin 5V 50mA Linear Regulator TO-252-5 | Diodes Inc ZXTR1005K4-13; Max Supply Voltage: 100V; Min Supply Voltage: 10V; Purpose Of Usage: BASIC; Topology: LDO; Manufacturer: Diodes; Manufacturer Part Number: ZXTR1005K4-13; RoHS: YES; Category: INTEGRATED CIRCUITS; Case/Package: TO-252 - 4; Lead Free: Lead Free; Max Operating Temperature: 125°C; Min Operating Temperature: -55°C; Mount: SMD; Stock ID: ??; Sub-Category: PMIC - LINEAR REGULATOR; Supplier 1: Digi-Key; Supplier Part Number 1: ZXTR1005K4-13DITR-ND
footprint TO-252 - 4
pins: 1 EN, 2 VIN (power), 3 VIN (power), 4 GND (power), 5 VOUT